# EAGLE library part TPS4HC120BQDGQRQ1 (library TPS4HC120BQDGQRQ1)
Power Switch ICs - Power Distribution Automotive, four-channel 120mohm smart high-side switch with low power mode Source: Datasheet <https://www.ti.com/lit/ds/symlink/tps4hc120-q1.pdf>
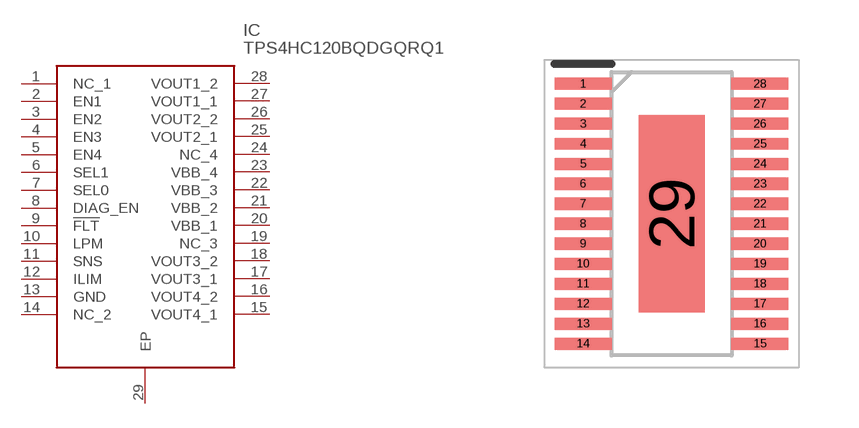
[diagram p0: symbol with the pads of SOP50P490X110-29N; footprint SOP50P490X110-29N]

Designator prefix IC

## TPS4HC120BQDGQRQ1 (Description: Power Switch ICs - Power Distribution Automotive, four-channel 120mohm smart high-side switch with low power mode; Height: 1.1mm; Manufacturer_Name: Texas Instruments; Manufacturer_Part_Number: TPS4HC120BQDGQRQ1)  [SOP50P490X110-29N]
1  NC_1
2  EN1
3  EN2
4  EN3
5  EN4
6  SEL1
7  SEL0
8  DIAG_EN
9  !FLT
10  LPM
11  SNS
12  ILIM
13  GND
14  NC_2
15  VOUT4_1
16  VOUT4_2
17  VOUT3_1
18  VOUT3_2
19  NC_3
20  VBB_1
21  VBB_2
22  VBB_3
23  VBB_4
24  NC_4
25  VOUT2_1
26  VOUT2_2
27  VOUT1_1
28  VOUT1_2
29  EP

## Footprint SOP50P490X110-29N (pad centres in mm)
DGQ0028A
smd 1.425 x 0.3: 1 -2.212,3.25; 2 -2.212,2.75; 3 -2.212,2.25; 4 -2.212,1.75; 5 -2.212,1.25; 6 -2.212,0.75; 7 -2.212,0.25; 8 -2.212,-0.25; 9 -2.212,-0.75; 10 -2.212,-1.25; 11 -2.212,-1.75; 12 -2.212,-2.25; 13 -2.212,-2.75; 14 -2.212,-3.25; 15 2.212,-3.25; 16 2.212,-2.75; 17 2.212,-2.25; 18 2.212,-1.75; 19 2.212,-1.25; 20 2.212,-0.75; 21 2.212,-0.25; 22 2.212,0.25; 23 2.212,0.75; 24 2.212,1.25; 25 2.212,1.75; 26 2.212,2.25; 27 2.212,2.75; 28 2.212,3.25
smd 1.65 x 4.94: 29 0,0